# Altium footprint library RCW_PcbLib.PcbLib: 61 footprints (part 4 of 4)
Each footprint in its own frame and in the unit in brackets; x right, y up, seen from the top. Pads: shape width x height; smd on the part's side, far side on the other; paste and mask are expansions set on the pad; w line width, h text height; cw(c..) or ccw(c..) is an arc to the next point about the centre after c.
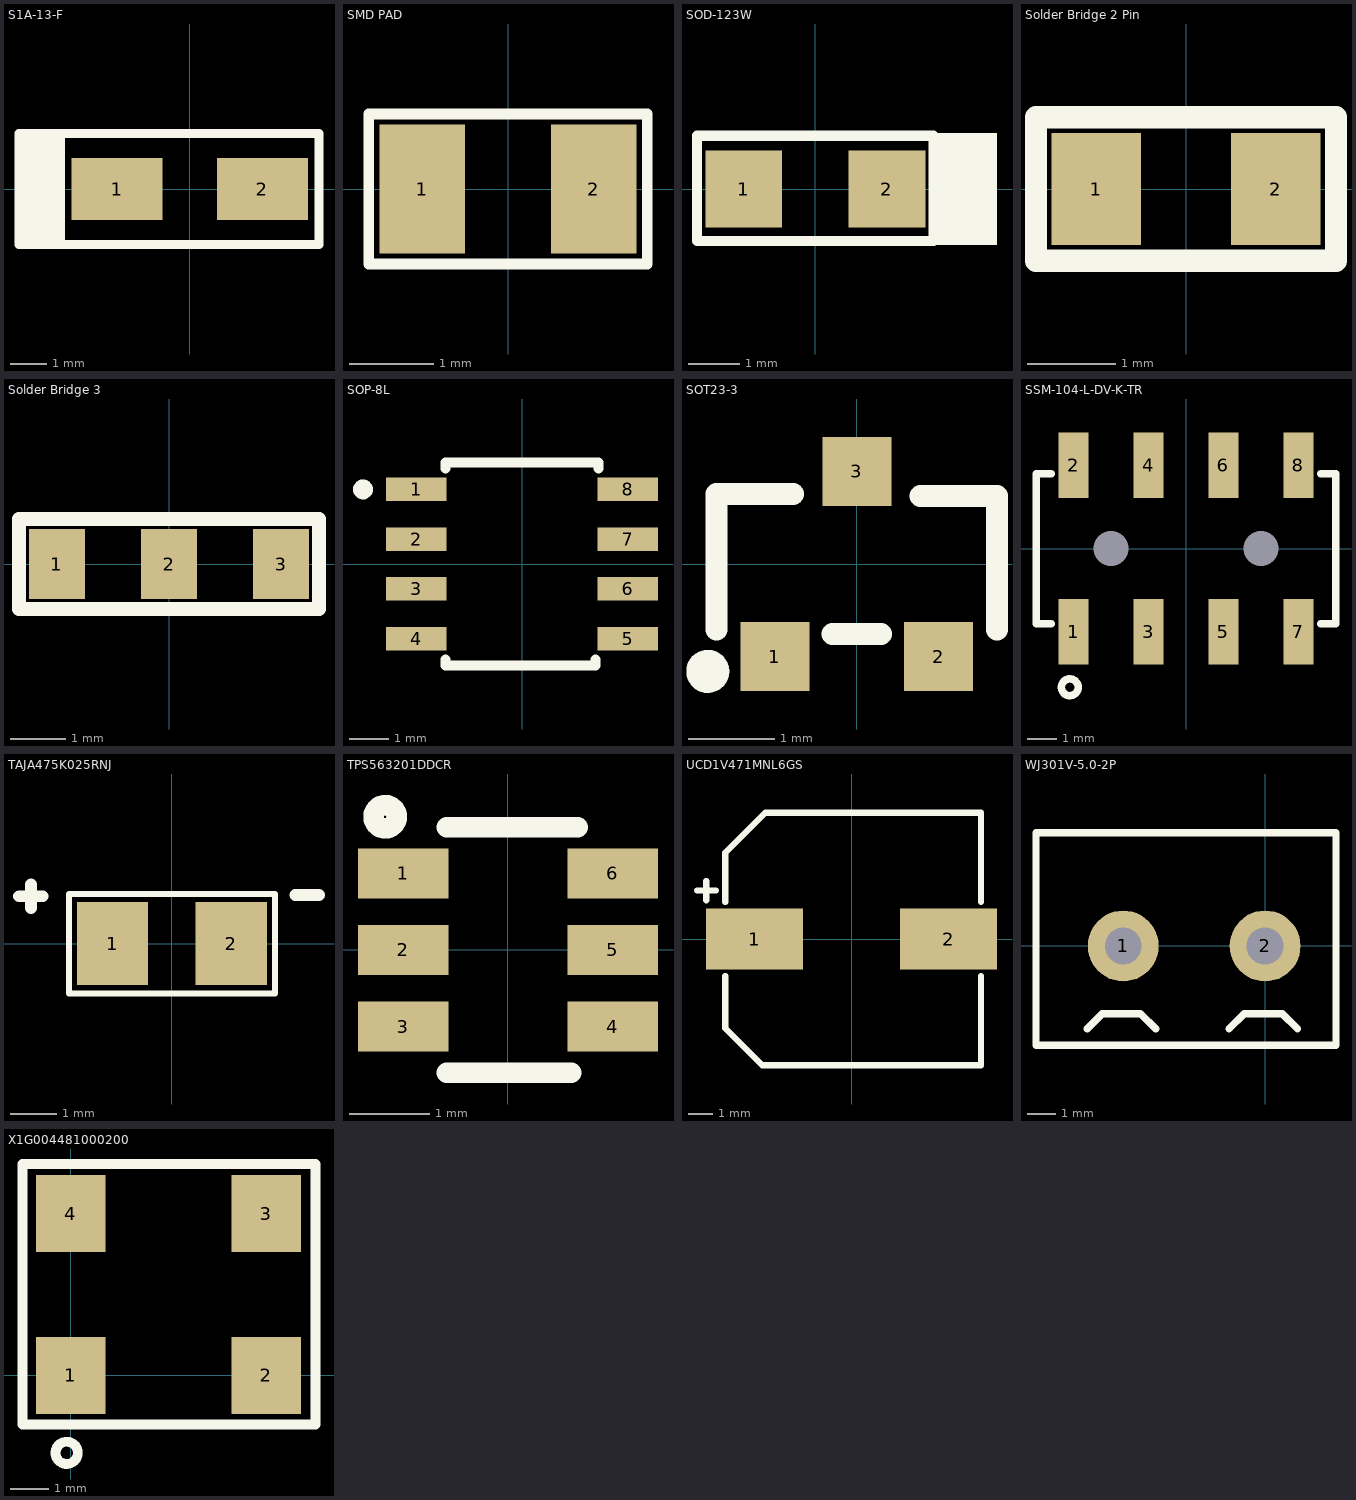
[diagram p3: the footprints below, top view; thin cyan lines are the x and y axes]

## S1A-13-F [mm] "DIODE GEN PURP 50V 1A SMA"
pads (2):
  rect 2.5x1.7 smd: 1(-2,0) 2(2,0)
Top Overlay:
  rectangle: -4.699,-1.524 -3.429,1.524
  lines w0.254: -4.699,-1.524 -4.699,1.524 3.556,1.524 3.556,-1.524 -4.699,-1.524
3D body "SMA_DIO.step": height 2.35, standoff 0, extent -2.795,-1.46 2.795,1.46

## SMD PAD [mil] "SMD 0805"
pads (2):
  rect 40x60 smd: 1(-40,0) 2(40,0)
Top Overlay:
  lines w5: -65,-35 -65,35 65,35 65,-35 -65,-35

## SOD-123W [mm] "DIODE SCHOTTKY 30V 1A SOD123W"
pads (2):
  rect 1.5x1.5 smd: 1(-1.4,0) 2(1.4,0)
Top Overlay:
  region: 3.553,1.092 2.308,1.092 2.308,-1.092 3.553,-1.092
  lines w0.2: -2.314,-1.016 -2.314,1.041 2.308,1.041 2.308,-1.016 -2.314,-1.016
3D body "User Library-SOD123W.STEP": height 1.1, standoff -0.01, extent -2.003,-0.95 1.997,0.95

## Solder Bridge 2 Pin [mil]
pads (2):
  rect 40x50 smd: 1(-40,0) 2(40,0)
Top Overlay:
  lines w10: -67,-32 -67,32 67,32 67,-32 -67,-32

## Solder Bridge 3 [mil]
pads (3):
  rect 40x50 smd: 1(-80,0) 2(0,0) 3(80,0)
Top Overlay:
  lines w10: -107,-32 -107,32 107,32 107,-32 -107,-32

## SOP-8L [mm] "Step-Down Positive Fixed 1 2A 150kHz SOP-8_150mil"
pads (8):
  rect 1.55x0.6 smd: 1(-2.7,1.905) 2(-2.7,0.635) 3(-2.7,-0.635) 4(-2.7,-1.905) 5(2.7,-1.905) 6(2.7,-0.635) 7(2.7,0.635) 8(2.7,1.905)
Top Overlay:
  circle w0.254: c-4.064,1.905 r0.127
  lines w0.254: -1.956,-2.438 -1.956,-2.591 1.88,-2.591 1.88,-2.438 ; -1.956,2.438 -1.956,2.591 1.956,2.591 1.956,2.438
3D body "SOP-8L_DIO.step": height 1.75, standoff 0, extent -3.125,-2.475 3.125,2.475

## SOT23-3 [mm] "SOT23, 3-Leads, Body 2.9x1.3mm, Pitch 0.95mm, Lead Span 2.3mm - Reverse Pinning, IPC High Density"
height 1.1
pads (3):
  rect 0.8x0.8 smd: 1(-0.95,-1.075) 2(0.95,-1.075) 3(0,1.075)
Top Overlay:
  circle w0.25: c-1.727,-1.245 r0.125
  lines w0.254: -1.626,-0.762 -1.626,0.813 -0.737,0.813 ; -0.28,-0.813 0.279,-0.813 ; 0.736,0.787 1.625,0.787 1.625,-0.762
3D body "CircuitWorks-SOT-23.step": height 1.05, standoff -0.05, extent -1.5,-1.25 1.5,1.25

## SSM-104-L-DV-K-TR [mm] "8 Position Receptacle, Pass Through Connector  Surface Mount"
pads (10):
  rect 1.02x2.22 smd: 1(-3.81,-2.825) 2(-3.81,2.825) 3(-1.27,-2.825) 4(-1.27,2.825) 5(1.27,-2.825) 6(1.27,2.825) 7(3.81,-2.825) 8(3.81,2.825)
  round 0 hole 1.19: MH1(-2.54,0) MH2(2.54,0)
Top Overlay:
  circle w0.254: c-3.937,-4.699 r0.284
  lines w0.254: -4.572,-2.54 -5.08,-2.54 -5.08,2.54 -4.572,2.54 ; 4.572,-2.54 5.08,-2.54 5.08,2.54 4.572,2.54
3D body "SSM-104-L-DV-K-TR.stp": height 7.54, standoff 0, extent -5.08,-3.518 5.08,3.518

## TAJA475K025RNJ [mil] "4.7uF ±10% 25V 3.1 O @ 100kHz -55? ~ +125? CASE-A_3216 Tantalum Capacitors RoHS"
pads (2):
  rect 60x70 smd: 1(-50,0) 2(50,0)
Top Overlay:
  lines w5: -87,-42 -87,42 87,42 87,-42 -87,-42
  lines w10: -129,40 -109,40 ; -119,30 -119,50 ; 104,41 124,41
3D body "User Library-1206 SMD Capacitor.step": height 39.45, standoff 0, extent -62.96,-31.46 63.03,31.53

## TPS563201DDCR [mm]
pads (6):
  rect 1.12x0.62 smd: 1(-1.3,0.95) 2(-1.3,0) 3(-1.3,-0.95) 4(1.3,-0.95) 5(1.3,0) 6(1.3,0.95)
Top Overlay:
  circle w0.254: c-1.524,1.651 r0.144
  lines w0.254: -0.762,-1.524 0.787,-1.524 ; -0.762,1.524 0.864,1.524
3D body "User Library-SOT23-6-2.step": height 1.44, standoff -0.01, extent -1.4,-1.45 1.4,1.45

## UCD1V471MNL6GS [mm] "470µF 35V Aluminum Electrolytic Capacitors Radial, Can - SMD  5000 Hrs @ 105°C"
pads (2):
  rect 4x2.5 smd: 1(-4,0) 2(4,0)
Top Overlay:
  lines w0.254: -6.375,2.007 -5.588,2.007 ; -5.994,1.6 -5.994,2.388 ; -5.207,-1.524 -5.207,-3.683 -3.683,-5.207 5.334,-5.207 5.334,-1.524 ; -5.207,1.524 -5.207,3.556 -3.556,5.207 5.334,5.207 5.334,1.524
3D body "CAP_UCD_10X13P5_NCH.step": height 14.05, standoff 0, extent -5.651,-5.156 5.651,5.156

## WJ301V-5.0-2P [mm]
pads (2):
  round 2.5 hole 1.3: 1(-5,0) 2(0,0)
Top Overlay:
  lines w0.254: -6.27,-2.921 -5.737,-2.388 -4.39,-2.388 -3.857,-2.921 ; -1.27,-2.921 -0.737,-2.388 0.61,-2.388 1.143,-2.921 ; -8.075,-3.496 2.5,-3.496 2.5,0 2.5,3.988 -8.075,3.988 -8.075,-3.496
3D body "2-pin.stp": height 10, standoff -4.2, extent -8.1,-3.496 2.5,4.004

## X1G004481000200 [mm] "24MHz ±100ppm 1.6V ~ 3.6V 3mA SMD-7050_4P SMD Oscillators(XO) RoHS"
pads (4):
  rect 1.8x2 smd: 1(0,0) 2(5.08,0) 3(5.08,4.2) 4(0,4.2)
Top Overlay:
  circle w0.254: c-0.102,-2.007 r0.29
  lines w0.254: -1.245,-1.27 6.35,-1.27 6.35,5.486 -1.245,5.486 -1.245,-1.27